# Altium footprint library XH，VH.PcbLib: 67 footprints (part 2 of 5)
Each footprint in its own frame and in the unit in brackets; x right, y up, seen from the top. Pads: shape width x height; smd on the part's side, far side on the other; paste and mask are expansions set on the pad; w line width, h text height; cw(c..) or ccw(c..) is an arc to the next point about the centre after c.
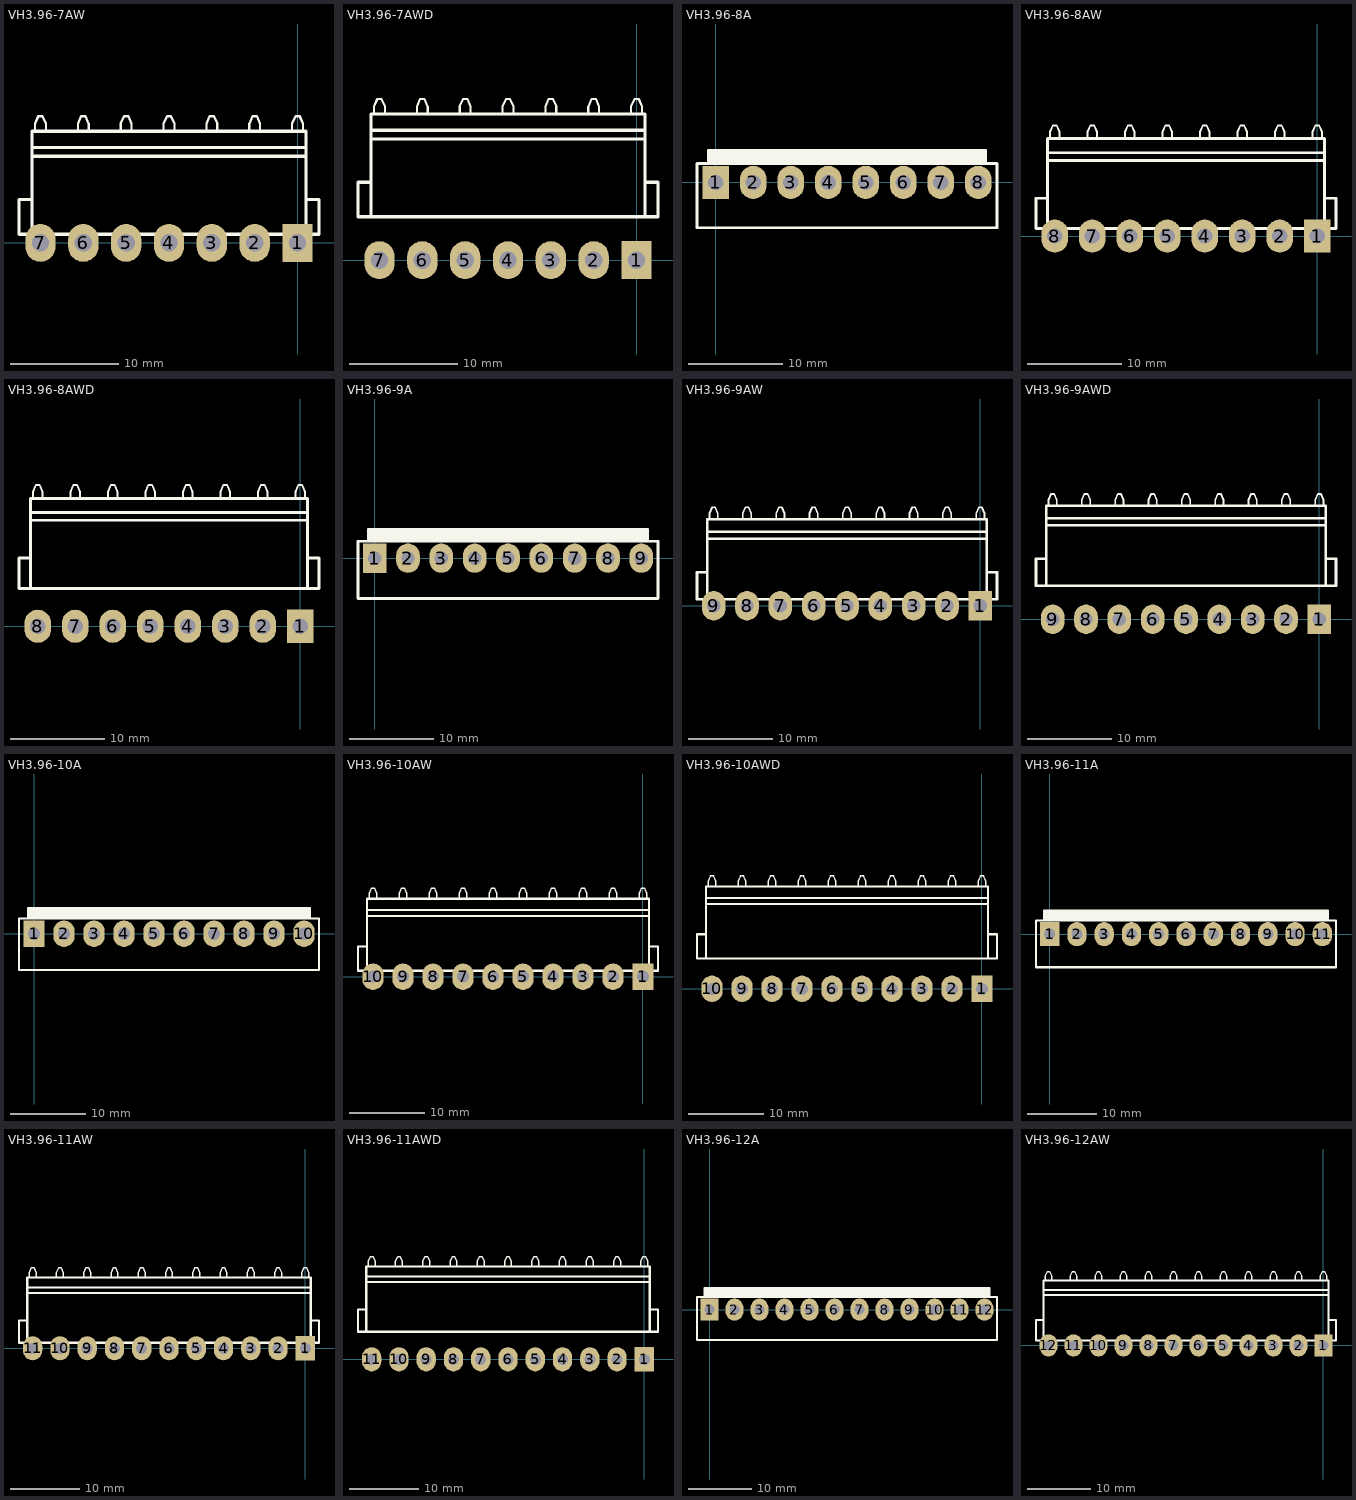
[diagram p1: the footprints below, top view; thin cyan lines are the x and y axes]

## VH3.96-7AW [mm]
pads (7):
  rect 2.8x3.5 hole 1.6: 1(0,0)
  oval 2.8x3.5 hole 1.6: 2(-3.96,0) 3(-7.92,0) 4(-11.88,0) 5(-15.84,0) 6(-19.8,0) 7(-23.76,0)
Top Overlay:
  lines w0.2: -24.26,10.3 -24.26,11 -23.96,11.7 -23.56,11.7 -23.26,11 -23.26,10.3 ; -20.3,10.3 -20.3,11 -20,11.7 -19.6,11.7 -19.3,11 -19.3,10.3 ; -16.34,10.3 -16.34,11 -16.04,11.7 -15.64,11.7 -15.34,11 -15.34,10.3 ; -12.38,10.3 -12.38,11 -12.08,11.7 -11.68,11.7 -11.38,11 -11.38,10.3 ; -8.42,10.3 -8.42,11 -8.12,11.7 -7.72,11.7 -7.42,11 -7.42,10.3 ; -4.46,10.3 -4.46,11 -4.16,11.7 -3.76,11.7 -3.46,11 -3.46,10.3 ; -0.5,10.3 -0.5,11 -0.2,11.7 0.2,11.7 0.5,11 0.5,10.3
  lines w0.3: -24.54,0.8 -24.54,10.3 0.78,10.3 0.78,0.8 ; -24.54,4 -25.74,4 -25.74,0.8 1.98,0.8 1.98,4 0.78,4 ; -24.54,8 0.78,8 ; -24.54,8.8 0.78,8.8
3D body "VH3.96-7AW.STEP": height 8.4, standoff -3.6, extent -25.74,-0.55 1.98,11.7

## VH3.96-7AWD [mm]
pads (7):
  rect 2.8x3.5 hole 1.6: 1(0,0)
  oval 2.8x3.5 hole 1.6: 2(-3.96,0) 3(-7.92,0) 4(-11.88,0) 5(-15.84,0) 6(-19.8,0) 7(-23.76,0)
Top Overlay:
  lines w0.2: -24.26,13.5 -24.26,14.2 -23.96,14.9 -23.56,14.9 -23.26,14.2 -23.26,13.5 ; -20.3,13.5 -20.3,14.2 -20,14.9 -19.6,14.9 -19.3,14.2 -19.3,13.5 ; -16.34,13.5 -16.34,14.2 -16.04,14.9 -15.64,14.9 -15.34,14.2 -15.34,13.5 ; -12.38,13.5 -12.38,14.2 -12.08,14.9 -11.68,14.9 -11.38,14.2 -11.38,13.5 ; -8.42,13.5 -8.42,14.2 -8.12,14.9 -7.72,14.9 -7.42,14.2 -7.42,13.5 ; -4.46,13.5 -4.46,14.2 -4.16,14.9 -3.76,14.9 -3.46,14.2 -3.46,13.5 ; -0.5,13.5 -0.5,14.2 -0.2,14.9 0.2,14.9 0.5,14.2 0.5,13.5
  lines w0.3: -24.54,4 -24.54,13.5 0.78,13.5 0.78,4 ; -24.54,7.2 -25.74,7.2 -25.74,4 1.98,4 1.98,7.2 0.78,7.2 ; -24.54,11.2 0.78,11.2 ; -24.54,12 0.78,12
3D body "VH3.96-7AW.STEP": height 8.4, standoff -3.6, extent -25.74,-0.55 1.98,14.9

## VH3.96-8A [mm]
pads (8):
  rect 2.8x3.5 hole 1.6: 1(0,0)
  oval 2.8x3.5 hole 1.6: 2(3.96,0) 3(7.92,0) 4(11.88,0) 5(15.84,0) 6(19.8,0) 7(23.76,0) 8(27.72,0)
Top Overlay:
  lines w0.3: -0.78,2 -0.78,3.4 28.5,3.4 28.5,2 ; -0.78,2.159 28.5,2.159 ; -0.78,2.413 28.5,2.413 ; -0.78,2.667 28.5,2.667 ; -0.78,2.921 28.5,2.921 ; -0.78,3.175 28.5,3.175 ; -1.98,-4.8 -1.98,2 29.7,2 29.7,-4.8 -1.98,-4.8
3D body "VH3.96-8A.STEP": height 14.6, standoff -3.6, extent -1.98,-4.8 29.7,3.6

## VH3.96-8AW [mm]
pads (8):
  rect 2.8x3.5 hole 1.6: 1(0,0)
  oval 2.8x3.5 hole 1.6: 2(-3.96,0) 3(-7.92,0) 4(-11.88,0) 5(-15.84,0) 6(-19.8,0) 7(-23.76,0) 8(-27.72,0)
Top Overlay:
  lines w0.2: -28.22,10.3 -28.22,11 -27.92,11.7 -27.52,11.7 -27.22,11 -27.22,10.3 ; -24.26,10.3 -24.26,11 -23.96,11.7 -23.56,11.7 -23.26,11 -23.26,10.3 ; -20.3,10.3 -20.3,11 -20,11.7 -19.6,11.7 -19.3,11 -19.3,10.3 ; -16.34,10.3 -16.34,11 -16.04,11.7 -15.64,11.7 -15.34,11 -15.34,10.3 ; -12.38,10.3 -12.38,11 -12.08,11.7 -11.68,11.7 -11.38,11 -11.38,10.3 ; -8.42,10.3 -8.42,11 -8.12,11.7 -7.72,11.7 -7.42,11 -7.42,10.3 ; -4.46,10.3 -4.46,11 -4.16,11.7 -3.76,11.7 -3.46,11 -3.46,10.3 ; -0.5,10.3 -0.5,11 -0.2,11.7 0.2,11.7 0.5,11 0.5,10.3
  lines w0.3: -28.5,0.8 -28.5,10.3 0.78,10.3 0.78,0.8 ; -28.5,4 -29.7,4 -29.7,0.8 1.98,0.8 1.98,4 0.78,4 ; -28.5,8 0.78,8 ; -28.5,8.8 0.78,8.8
3D body "VH3.96-8AW.STEP": height 8.4, standoff -3.6, extent -29.7,-0.55 1.98,11.7

## VH3.96-8AWD [mm]
pads (8):
  rect 2.8x3.5 hole 1.6: 1(0,0)
  oval 2.8x3.5 hole 1.6: 2(-3.96,0) 3(-7.92,0) 4(-11.88,0) 5(-15.84,0) 6(-19.8,0) 7(-23.76,0) 8(-27.72,0)
Top Overlay:
  lines w0.2: -28.22,13.5 -28.22,14.2 -27.92,14.9 -27.52,14.9 -27.22,14.2 -27.22,13.5 ; -24.26,13.5 -24.26,14.2 -23.96,14.9 -23.56,14.9 -23.26,14.2 -23.26,13.5 ; -20.3,13.5 -20.3,14.2 -20,14.9 -19.6,14.9 -19.3,14.2 -19.3,13.5 ; -16.34,13.5 -16.34,14.2 -16.04,14.9 -15.64,14.9 -15.34,14.2 -15.34,13.5 ; -12.38,13.5 -12.38,14.2 -12.08,14.9 -11.68,14.9 -11.38,14.2 -11.38,13.5 ; -8.42,13.5 -8.42,14.2 -8.12,14.9 -7.72,14.9 -7.42,14.2 -7.42,13.5 ; -4.46,13.5 -4.46,14.2 -4.16,14.9 -3.76,14.9 -3.46,14.2 -3.46,13.5 ; -0.5,13.5 -0.5,14.2 -0.2,14.9 0.2,14.9 0.5,14.2 0.5,13.5
  lines w0.3: -28.5,4 -28.5,13.5 0.78,13.5 0.78,4 ; -28.5,7.2 -29.7,7.2 -29.7,4 1.98,4 1.98,7.2 0.78,7.2 ; -28.5,11.2 0.78,11.2 ; -28.5,12 0.78,12
3D body "VH3.96-8AW.STEP": height 8.4, standoff -3.6, extent -29.7,-0.55 1.98,14.9

## VH3.96-9A [mm]
pads (9):
  rect 2.8x3.5 hole 1.6: 1(0,0)
  oval 2.8x3.5 hole 1.6: 2(3.96,0) 3(7.92,0) 4(11.88,0) 5(15.84,0) 6(19.8,0) 7(23.76,0) 8(27.72,0) 9(31.68,0)
Top Overlay:
  lines w0.3: -0.78,2 -0.78,3.4 32.46,3.4 32.46,2 ; -0.78,2.159 32.46,2.159 ; -0.78,2.413 32.46,2.413 ; -0.78,2.667 32.46,2.667 ; -0.78,2.921 32.46,2.921 ; -0.78,3.175 32.46,3.175 ; -1.98,-4.8 33.66,-4.8 33.66,2 -1.98,2 -1.98,-4.8
3D body "VH3.96-9A.STEP": height 14.6, standoff -3.6, extent -1.98,-4.8 33.66,3.6

## VH3.96-9AW [mm]
pads (9):
  rect 2.8x3.5 hole 1.6: 1(0,0)
  oval 2.8x3.5 hole 1.6: 2(-3.96,0) 3(-7.92,0) 4(-11.88,0) 5(-15.84,0) 6(-19.8,0) 7(-23.76,0) 8(-27.72,0) 9(-31.68,0)
Top Overlay:
  lines w0.2: -32.18,10.3 -32.18,11 -31.88,11.7 -31.48,11.7 -31.18,11 -31.18,10.3 ; -28.22,10.3 -28.22,11 -27.92,11.7 -27.52,11.7 -27.22,11 -27.22,10.3 ; -24.26,10.3 -24.26,11 -23.96,11.7 -23.56,11.7 -23.26,11 -23.26,10.3 ; -20.3,10.3 -20.3,11 -20,11.7 -19.6,11.7 -19.3,11 -19.3,10.3 ; -16.34,10.3 -16.34,11 -16.04,11.7 -15.64,11.7 -15.34,11 -15.34,10.3 ; -12.38,10.3 -12.38,11 -12.08,11.7 -11.68,11.7 -11.38,11 -11.38,10.3 ; -8.42,10.3 -8.42,11 -8.12,11.7 -7.72,11.7 -7.42,11 -7.42,10.3 ; -4.46,10.3 -4.46,11 -4.16,11.7 -3.76,11.7 -3.46,11 -3.46,10.3 ; -0.5,10.3 -0.5,11 -0.2,11.7 0.2,11.7 0.5,11 0.5,10.3
  lines w0.3: -32.46,0.8 -32.46,10.3 0.78,10.3 0.78,0.8 ; -32.46,4 -33.66,4 -33.66,0.8 1.98,0.8 1.98,4 0.78,4 ; -32.46,8 0.78,8 ; -32.46,8.8 0.78,8.8
3D body "VH3.96-9AW.STEP": height 8.4, standoff -3.6, extent -33.66,-0.55 1.98,11.7

## VH3.96-9AWD [mm]
pads (9):
  rect 2.8x3.5 hole 1.6: 1(0,0)
  oval 2.8x3.5 hole 1.6: 2(-3.96,0) 3(-7.92,0) 4(-11.88,0) 5(-15.84,0) 6(-19.8,0) 7(-23.76,0) 8(-27.72,0) 9(-31.68,0)
Top Overlay:
  lines w0.2: -32.18,13.5 -32.18,14.2 -31.88,14.9 -31.48,14.9 -31.18,14.2 -31.18,13.5 ; -28.22,13.5 -28.22,14.2 -27.92,14.9 -27.52,14.9 -27.22,14.2 -27.22,13.5 ; -24.26,13.5 -24.26,14.2 -23.96,14.9 -23.56,14.9 -23.26,14.2 -23.26,13.5 ; -20.3,13.5 -20.3,14.2 -20,14.9 -19.6,14.9 -19.3,14.2 -19.3,13.5 ; -16.34,13.5 -16.34,14.2 -16.04,14.9 -15.64,14.9 -15.34,14.2 -15.34,13.5 ; -12.38,13.5 -12.38,14.2 -12.08,14.9 -11.68,14.9 -11.38,14.2 -11.38,13.5 ; -8.42,13.5 -8.42,14.2 -8.12,14.9 -7.72,14.9 -7.42,14.2 -7.42,13.5 ; -4.46,13.5 -4.46,14.2 -4.16,14.9 -3.76,14.9 -3.46,14.2 -3.46,13.5 ; -0.5,13.5 -0.5,14.2 -0.2,14.9 0.2,14.9 0.5,14.2 0.5,13.5
  lines w0.3: -32.46,4 -32.46,13.5 0.78,13.5 0.78,4 ; -32.46,7.2 -33.66,7.2 -33.66,4 1.98,4 1.98,7.2 0.78,7.2 ; -32.46,11.2 0.78,11.2 ; -32.46,12 0.78,12
3D body "VH3.96-9AW.STEP": height 8.4, standoff -3.6, extent -33.66,-0.55 1.98,14.9

## VH3.96-10A [mm]
pads (10):
  rect 2.8x3.5 hole 1.6: 1(0,0)
  oval 2.8x3.5 hole 1.6: 2(3.96,0) 3(7.92,0) 4(11.88,0) 5(15.84,0) 6(19.8,0) 7(23.76,0) 8(27.72,0) 9(31.68,0) 10(35.64,0)
Top Overlay:
  lines w0.3: -0.78,2 -0.78,3.4 36.42,3.4 36.42,2 ; -0.78,2.159 36.42,2.159 ; -0.78,2.413 36.42,2.413 ; -0.78,2.667 36.42,2.667 ; -0.78,2.921 36.42,2.921 ; -0.78,3.175 36.42,3.175 ; -1.98,-4.8 -1.98,2 37.62,2 37.62,-4.8 -1.98,-4.8
3D body "VH3.96-10A.STEP": height 14.6, standoff -3.6, extent -1.98,-4.8 37.62,3.6

## VH3.96-10AW [mm]
pads (10):
  rect 2.8x3.5 hole 1.6: 1(0,0)
  oval 2.8x3.5 hole 1.6: 2(-3.96,0) 3(-7.92,0) 4(-11.88,0) 5(-15.84,0) 6(-19.8,0) 7(-23.76,0) 8(-27.72,0) 9(-31.68,0) 10(-35.64,0)
Top Overlay:
  lines w0.2: -36.14,10.3 -36.14,11 -35.84,11.7 -35.44,11.7 -35.14,11 -35.14,10.3 ; -32.18,10.3 -32.18,11 -31.88,11.7 -31.48,11.7 -31.18,11 -31.18,10.3 ; -28.22,10.3 -28.22,11 -27.92,11.7 -27.52,11.7 -27.22,11 -27.22,10.3 ; -24.26,10.3 -24.26,11 -23.96,11.7 -23.56,11.7 -23.26,11 -23.26,10.3 ; -20.3,10.3 -20.3,11 -20,11.7 -19.6,11.7 -19.3,11 -19.3,10.3 ; -16.34,10.3 -16.34,11 -16.04,11.7 -15.64,11.7 -15.34,11 -15.34,10.3 ; -12.38,10.3 -12.38,11 -12.08,11.7 -11.68,11.7 -11.38,11 -11.38,10.3 ; -8.42,10.3 -8.42,11 -8.12,11.7 -7.72,11.7 -7.42,11 -7.42,10.3 ; -4.46,10.3 -4.46,11 -4.16,11.7 -3.76,11.7 -3.46,11 -3.46,10.3 ; -0.5,10.3 -0.5,11 -0.2,11.7 0.2,11.7 0.5,11 0.5,10.3
  lines w0.3: -36.42,0.8 -36.42,10.3 0.78,10.3 0.78,0.8 ; -36.42,4 -37.62,4 -37.62,0.8 1.98,0.8 1.98,4 0.78,4 ; -36.42,8 0.78,8 ; -36.42,8.8 0.78,8.8
3D body "VH3.96-10AW.STEP": height 8.4, standoff -3.6, extent -37.62,-0.55 1.98,11.7

## VH3.96-10AWD [mm]
pads (10):
  rect 2.8x3.5 hole 1.6: 1(0,0)
  oval 2.8x3.5 hole 1.6: 2(-3.96,0) 3(-7.92,0) 4(-11.88,0) 5(-15.84,0) 6(-19.8,0) 7(-23.76,0) 8(-27.72,0) 9(-31.68,0) 10(-35.64,0)
Top Overlay:
  lines w0.2: -36.14,13.5 -36.14,14.2 -35.84,14.9 -35.44,14.9 -35.14,14.2 -35.14,13.5 ; -32.18,13.5 -32.18,14.2 -31.88,14.9 -31.48,14.9 -31.18,14.2 -31.18,13.5 ; -28.22,13.5 -28.22,14.2 -27.92,14.9 -27.52,14.9 -27.22,14.2 -27.22,13.5 ; -24.26,13.5 -24.26,14.2 -23.96,14.9 -23.56,14.9 -23.26,14.2 -23.26,13.5 ; -20.3,13.5 -20.3,14.2 -20,14.9 -19.6,14.9 -19.3,14.2 -19.3,13.5 ; -16.34,13.5 -16.34,14.2 -16.04,14.9 -15.64,14.9 -15.34,14.2 -15.34,13.5 ; -12.38,13.5 -12.38,14.2 -12.08,14.9 -11.68,14.9 -11.38,14.2 -11.38,13.5 ; -8.42,13.5 -8.42,14.2 -8.12,14.9 -7.72,14.9 -7.42,14.2 -7.42,13.5 ; -4.46,13.5 -4.46,14.2 -4.16,14.9 -3.76,14.9 -3.46,14.2 -3.46,13.5 ; -0.5,13.5 -0.5,14.2 -0.2,14.9 0.2,14.9 0.5,14.2 0.5,13.5
  lines w0.3: -36.42,4 -36.42,13.5 0.78,13.5 0.78,4 ; -36.42,7.2 -37.62,7.2 -37.62,4 1.98,4 1.98,7.2 0.78,7.2 ; -36.42,11.2 0.78,11.2 ; -36.42,12 0.78,12
3D body "VH3.96-10AW.STEP": height 8.4, standoff -3.6, extent -37.62,-0.55 1.98,14.9

## VH3.96-11A [mm]
pads (11):
  rect 2.8x3.5 hole 1.6: 1(0,0)
  oval 2.8x3.5 hole 1.6: 2(3.96,0) 3(7.92,0) 4(11.88,0) 5(15.84,0) 6(19.8,0) 7(23.76,0) 8(27.72,0) 9(31.68,0) 10(35.64,0) 11(39.6,0)
Top Overlay:
  lines w0.3: -0.78,2 -0.78,3.4 40.38,3.4 40.38,2 ; -0.78,2.159 40.38,2.159 ; -0.78,2.413 40.38,2.413 ; -0.78,2.667 40.38,2.667 ; -0.78,2.921 40.38,2.921 ; -0.78,3.175 40.38,3.175 ; -1.98,-4.8 41.58,-4.8 41.58,2 -1.98,2 -1.98,-4.8
3D body "VH3.96-11A.STEP": height 14.6, standoff -3.6, extent -1.98,-4.8 41.58,3.6

## VH3.96-11AW [mm]
pads (11):
  rect 2.8x3.5 hole 1.6: 1(0,0)
  oval 2.8x3.5 hole 1.6: 2(-3.96,0) 3(-7.92,0) 4(-11.88,0) 5(-15.84,0) 6(-19.8,0) 7(-23.76,0) 8(-27.72,0) 9(-31.68,0) 10(-35.64,0) 11(-39.6,0)
Top Overlay:
  lines w0.2: -40.1,10.3 -40.1,11 -39.8,11.7 -39.4,11.7 -39.1,11 -39.1,10.3 ; -36.14,10.3 -36.14,11 -35.84,11.7 -35.44,11.7 -35.14,11 -35.14,10.3 ; -32.18,10.3 -32.18,11 -31.88,11.7 -31.48,11.7 -31.18,11 -31.18,10.3 ; -28.22,10.3 -28.22,11 -27.92,11.7 -27.52,11.7 -27.22,11 -27.22,10.3 ; -24.26,10.3 -24.26,11 -23.96,11.7 -23.56,11.7 -23.26,11 -23.26,10.3 ; -20.3,10.3 -20.3,11 -20,11.7 -19.6,11.7 -19.3,11 -19.3,10.3 ; -16.34,10.3 -16.34,11 -16.04,11.7 -15.64,11.7 -15.34,11 -15.34,10.3 ; -12.38,10.3 -12.38,11 -12.08,11.7 -11.68,11.7 -11.38,11 -11.38,10.3 ; -8.42,10.3 -8.42,11 -8.12,11.7 -7.72,11.7 -7.42,11 -7.42,10.3 ; -4.46,10.3 -4.46,11 -4.16,11.7 -3.76,11.7 -3.46,11 -3.46,10.3 ; -0.5,10.3 -0.5,11 -0.2,11.7 0.2,11.7 0.5,11 0.5,10.3
  lines w0.3: -40.38,0.8 -40.38,10.3 0.78,10.3 0.78,0.8 ; -40.38,4 -41.58,4 -41.58,0.8 1.98,0.8 1.98,4 0.78,4 ; -40.38,8 0.78,8 ; -40.38,8.8 0.78,8.8
3D body "VH3.96-11AW.STEP": height 8.4, standoff -3.6, extent -41.58,-0.55 1.98,11.7

## VH3.96-11AWD [mm]
pads (11):
  rect 2.8x3.5 hole 1.6: 1(0,0)
  oval 2.8x3.5 hole 1.6: 2(-3.96,0) 3(-7.92,0) 4(-11.88,0) 5(-15.84,0) 6(-19.8,0) 7(-23.76,0) 8(-27.72,0) 9(-31.68,0) 10(-35.64,0) 11(-39.6,0)
Top Overlay:
  lines w0.2: -40.1,13.5 -40.1,14.2 -39.8,14.9 -39.4,14.9 -39.1,14.2 -39.1,13.5 ; -36.14,13.5 -36.14,14.2 -35.84,14.9 -35.44,14.9 -35.14,14.2 -35.14,13.5 ; -32.18,13.5 -32.18,14.2 -31.88,14.9 -31.48,14.9 -31.18,14.2 -31.18,13.5 ; -28.22,13.5 -28.22,14.2 -27.92,14.9 -27.52,14.9 -27.22,14.2 -27.22,13.5 ; -24.26,13.5 -24.26,14.2 -23.96,14.9 -23.56,14.9 -23.26,14.2 -23.26,13.5 ; -20.3,13.5 -20.3,14.2 -20,14.9 -19.6,14.9 -19.3,14.2 -19.3,13.5 ; -16.34,13.5 -16.34,14.2 -16.04,14.9 -15.64,14.9 -15.34,14.2 -15.34,13.5 ; -12.38,13.5 -12.38,14.2 -12.08,14.9 -11.68,14.9 -11.38,14.2 -11.38,13.5 ; -8.42,13.5 -8.42,14.2 -8.12,14.9 -7.72,14.9 -7.42,14.2 -7.42,13.5 ; -4.46,13.5 -4.46,14.2 -4.16,14.9 -3.76,14.9 -3.46,14.2 -3.46,13.5 ; -0.5,13.5 -0.5,14.2 -0.2,14.9 0.2,14.9 0.5,14.2 0.5,13.5
  lines w0.3: -40.38,4 -40.38,13.5 0.78,13.5 0.78,4 ; -40.38,7.2 -41.58,7.2 -41.58,4 1.98,4 1.98,7.2 0.78,7.2 ; -40.38,11.2 0.78,11.2 ; -40.38,12 0.78,12
3D body "VH3.96-11AW.STEP": height 8.4, standoff -3.6, extent -41.58,-0.55 1.98,14.9

## VH3.96-12A [mm]
pads (12):
  rect 2.8x3.5 hole 1.6: 1(0,0)
  oval 2.8x3.5 hole 1.6: 2(3.96,0) 3(7.92,0) 4(11.88,0) 5(15.84,0) 6(19.8,0) 7(23.76,0) 8(27.72,0) 9(31.68,0) 10(35.64,0) 11(39.6,0) 12(43.56,0)
Top Overlay:
  lines w0.3: -0.78,2 -0.78,3.4 44.34,3.4 44.34,2 ; -0.78,2.159 44.34,2.159 ; -0.78,2.413 44.34,2.413 ; -0.78,2.667 44.34,2.667 ; -0.78,2.921 44.34,2.921 ; -0.78,3.175 44.34,3.175 ; -1.98,-4.8 45.54,-4.8 45.54,2 -1.98,2 -1.98,-4.8
3D body "VH3.96-12A.STEP": height 14.6, standoff -3.6, extent -1.98,-4.8 45.54,3.6

## VH3.96-12AW [mm]
pads (12):
  rect 2.8x3.5 hole 1.6: 1(0,0)
  oval 2.8x3.5 hole 1.6: 2(-3.96,0) 3(-7.92,0) 4(-11.88,0) 5(-15.84,0) 6(-19.8,0) 7(-23.76,0) 8(-27.72,0) 9(-31.68,0) 10(-35.64,0) 11(-39.6,0) 12(-43.56,0)
Top Overlay:
  lines w0.2: -44.06,10.3 -44.06,11 -43.76,11.7 -43.36,11.7 -43.06,11 -43.06,10.3 ; -40.1,10.3 -40.1,11 -39.8,11.7 -39.4,11.7 -39.1,11 -39.1,10.3 ; -36.14,10.3 -36.14,11 -35.84,11.7 -35.44,11.7 -35.14,11 -35.14,10.3 ; -32.18,10.3 -32.18,11 -31.88,11.7 -31.48,11.7 -31.18,11 -31.18,10.3 ; -28.22,10.3 -28.22,11 -27.92,11.7 -27.52,11.7 -27.22,11 -27.22,10.3 ; -24.26,10.3 -24.26,11 -23.96,11.7 -23.56,11.7 -23.26,11 -23.26,10.3 ; -20.3,10.3 -20.3,11 -20,11.7 -19.6,11.7 -19.3,11 -19.3,10.3 ; -16.34,10.3 -16.34,11 -16.04,11.7 -15.64,11.7 -15.34,11 -15.34,10.3 ; -12.38,10.3 -12.38,11 -12.08,11.7 -11.68,11.7 -11.38,11 -11.38,10.3 ; -8.42,10.3 -8.42,11 -8.12,11.7 -7.72,11.7 -7.42,11 -7.42,10.3 ; -4.46,10.3 -4.46,11 -4.16,11.7 -3.76,11.7 -3.46,11 -3.46,10.3 ; -0.5,10.3 -0.5,11 -0.2,11.7 0.2,11.7 0.5,11 0.5,10.3
  lines w0.3: -44.34,0.8 -44.34,10.3 0.78,10.3 0.78,0.8 ; -44.34,4 -45.54,4 -45.54,0.8 1.98,0.8 1.98,4 0.78,4 ; -44.34,8 0.78,8 ; -44.34,8.8 0.78,8.8
3D body "VH3.96-12AW.STEP": height 8.4, standoff -3.6, extent -45.54,-0.55 1.98,11.7